# Altium footprint library PcbLib1.PcbLib: 4 footprints
Each footprint in its own frame and in the unit in brackets; x right, y up, seen from the top. Pads: shape width x height; smd on the part's side, far side on the other; paste and mask are expansions set on the pad; w line width, h text height; cw(c..) or ccw(c..) is an arc to the next point about the centre after c.
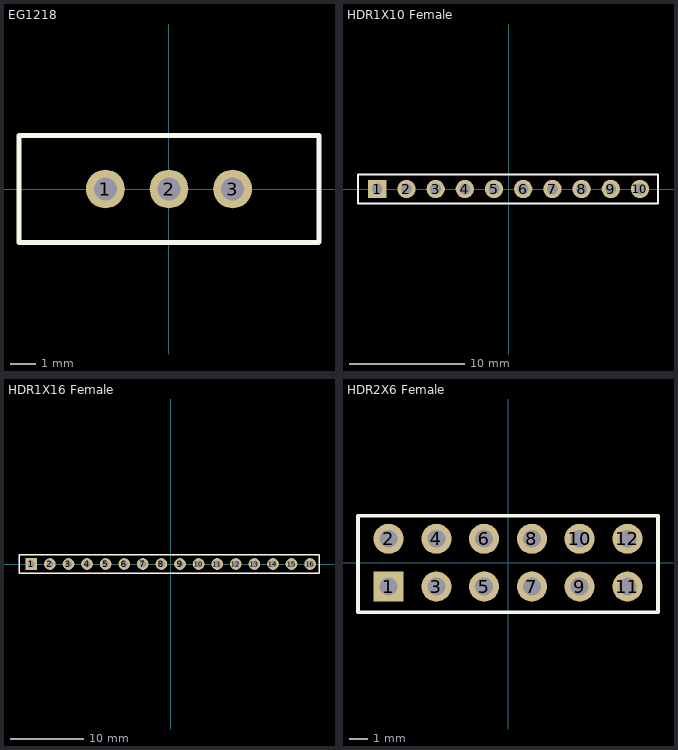
[diagram p0: the footprints below, top view; thin cyan lines are the x and y axes]

## EG1218 [mil]
pads (3):
  round 60 hole 35.43: 1(-98.43,0) 2(0,0) 3(98.43,0)
Top Overlay:
  lines w7.87: 231,83 -232,83 -232,-83 231,-83 232,-82 232,83
3D body "EG1218--3DModel-STEP-520916.STEP": height 275.59, standoff -200.79, extent -228.35,-78.74 228.35,78.74

## HDR1X10 Female [mm]
pads (10):
  rect 1.6x1.6 hole 0.95: 1(-11.43,0)
  round 1.6 hole 0.95: 2(-8.89,0) 3(-6.35,0) 4(-3.81,0) 5(-1.27,0) 6(1.27,0) 7(3.81,0) 8(6.35,0) 9(8.89,0) 10(11.43,0)
Top Overlay:
  lines w0.2: -13.106,-1.27 13,-1.27 13,1.27 -13.106,1.27 -13.106,-1.27
3D body "zl262-10s_p2-54_l25-9_w2-5_h8-5.stp": height 8.5, standoff -3, extent -12.95,-1.27 12.95,1.27

## HDR1X16 Female [mm]
pads (16):
  rect 1.6x1.6 hole 0.95: 1(-19.05,0)
  round 1.6 hole 0.95: 2(-16.51,0) 3(-13.97,0) 4(-11.43,0) 5(-8.89,0) 6(-6.35,0) 7(-3.81,0) 8(-1.27,0) 9(1.27,0) 10(3.81,0) 11(6.35,0) 12(8.89,0) 13(11.43,0) 14(13.97,0) 15(16.51,0) 16(19.05,0)
Top Overlay:
  lines w0.2: -20.726,-1.27 -20.726,1.27 20.26,1.27 20.26,-1.27 -20.726,-1.27
3D body "Header Female 1x16.STEP": height 8.61, standoff -3.26, extent -20.635,-1.238 20.155,1.238

## HDR2X6 Female [mm]
pads (12):
  rect 1.6x1.6 hole 0.95: 1(-6.35,-1.27)
  round 1.6 hole 0.95: 2(-6.35,1.27) 3(-3.81,-1.27) 4(-3.81,1.27) 5(-1.27,-1.27) 6(-1.27,1.27) 7(1.27,-1.27) 8(1.27,1.27) 9(3.81,-1.27) 10(3.81,1.27) 11(6.35,-1.27) 12(6.35,1.27)
Top Overlay:
  lines w0.2: 7.976,-2.643 1.038,-2.643 -1.365,-2.643 -7.976,-2.643 -7.976,2.5 7.976,2.5 7.976,-2.631
3D body "12-Pin Header - Female - Double - 2.54mm.step": height 8.5, standoff -3, extent -7.87,-2.56 7.87,2.44